# Altium footprint library Screw.PcbLib: 3 footprints
Each footprint in its own frame and in the unit in brackets; x right, y up, seen from the top. Pads: shape width x height; smd on the part's side, far side on the other; paste and mask are expansions set on the pad; w line width, h text height; cw(c..) or ccw(c..) is an arc to the next point about the centre after c.
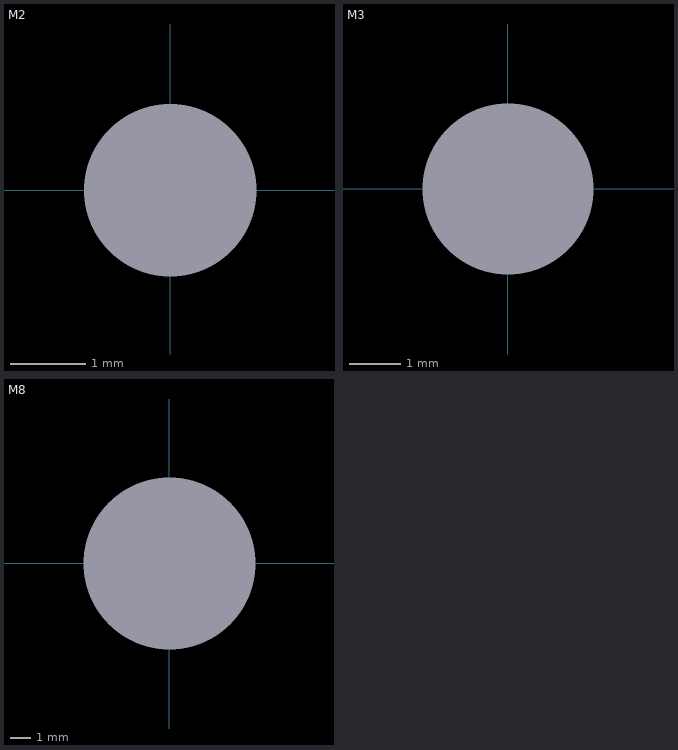
[diagram p0: the footprints below, top view; thin cyan lines are the x and y axes]

## M2 [mm]
pads (1):
  round 0 hole 2.3 unplated mask+0.85: ""(0,0)
Multi-Layer:
  pour cut-out: 1.986,0.014 1.986,-0.183 1.909,-0.569 1.758,-0.933 1.539,-1.261 1.261,-1.539 0.933,-1.758 0.569,-1.909 0.183,-1.986 -0.014,-1.986 -0.211,-1.986 -0.598,-1.909 -0.962,-1.758 -1.289,-1.539 -1.568,-1.261 -1.787,-0.933 -1.937,-0.569 -2.014,-0.183 -2.014,0.014 -2.014,0.211 -1.937,0.598 -1.787,0.962 -1.568,1.289 -1.289,1.568 -0.962,1.787 -0.598,1.937 -0.211,2.014 -0.014,2.014 0.183,2.014 0.569,1.937 0.933,1.787 1.261,1.568 1.539,1.289 1.758,0.962 1.909,0.598 1.986,0.211
3D body "91290A012_Alloy Steel Socket Head Screw.STEP": height 2, standoff -5, extent -1.9,-1.9 1.9,1.9

## M3 [mil]
pads (1):
  round 60 hole 129.92 unplated mask+49.21: ""(0,0)
Multi-Layer:
  pour cut-out: 0,-114.17 -7.48,-114.17 -22.32,-112.22 -36.78,-108.35 -50.61,-102.62 -63.57,-95.14 -75.44,-86.02 -86.02,-75.44 -95.14,-63.57 -102.62,-50.61 -108.35,-36.78 -112.22,-22.32 -114.17,-7.48 -114.17,0 -114.17,7.48 -112.22,22.32 -108.35,36.78 -102.62,50.61 -95.14,63.57 -86.02,75.44 -75.44,86.02 -63.57,95.13 -50.61,102.62 -36.78,108.35 -22.32,112.22 -7.48,114.17 0,114.17 7.48,114.17 22.32,112.22 36.78,108.35 50.61,102.62 63.57,95.14 75.44,86.02 86.02,75.44 95.14,63.57 102.62,50.61 108.35,36.78 112.22,22.32 114.17,7.48 114.17,0 114.17,-7.48 112.22,-22.32 108.35,-36.78 102.62,-50.61 95.14,-63.57 86.02,-75.44 75.44,-86.02 63.57,-95.14 50.61,-102.62 36.78,-108.35 22.32,-112.22 7.48,-114.17
3D body "M3x5 (1).SLDPRT": height 118.11, standoff -196.85, extent -108.27,-108.15 108.27,108.15

## M8 [mm]
pads (1):
  round 0 hole 8.3 unplated mask+3: ""(0,0)
Multi-Layer:
  pour cut-out: 7.221,-0.156 7.209,-0.488 7.124,-1.148 6.98,-1.797 6.778,-2.431 6.52,-3.044 6.207,-3.631 5.842,-4.187 5.428,-4.707 4.969,-5.189 4.469,-5.626 3.93,-6.017 3.359,-6.357 2.759,-6.644 2.135,-6.876 1.493,-7.05 0.838,-7.165 0.507,-7.193 0.151,-7.207 -0.559,-7.167 -1.263,-7.059 -1.953,-6.886 -2.623,-6.648 -3.269,-6.348 -3.882,-5.988 -4.459,-5.571 -4.994,-5.102 -5.483,-4.584 -5.919,-4.022 -6.301,-3.422 -6.624,-2.788 -6.886,-2.126 -7.084,-1.442 -7.216,-0.743 -7.249,-0.389 -7.268,-0.035 -7.236,0.674 -7.134,1.375 -6.963,2.064 -6.725,2.732 -6.421,3.372 -6.055,3.98 -5.631,4.549 -5.153,5.072 -4.625,5.546 -4.053,5.964 -3.442,6.324 -2.798,6.622 -2.128,6.854 -1.438,7.019 -0.735,7.115 -0.381,7.127 -0.012,7.15 0.727,7.118 1.459,7.011 2.175,6.829 2.87,6.574 3.534,6.249 4.162,5.858 4.745,5.404 5.279,4.892 5.758,4.328 6.176,3.718 6.529,3.068 6.813,2.385 7.026,1.677 7.164,0.951 7.227,0.214
3D body "M8 Allenkey Bold.STEP": height 8, standoff -30, extent -6.5,-6.482 6.5,6.482